# Altium schematic symbol library PCM2706CPJTR.SchLib: 1 symbol
Pins are listed as number, name and electrical type; pins without a type are passive.

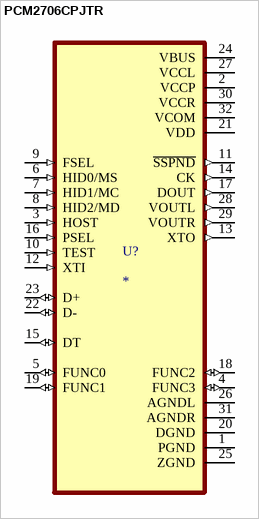
[diagram p0: symbol PCM2706CPJTR]

## PCM2706CPJTR
designator U?
MP: PCM2706CPJTR; Package: None; Price: None; Value: *; Availability: Unavailable
footprint QFP80P900X900X120-32N
pins: 1 PGND (power), 2 VCCP (power), 3 HOST (in), 4 FUNC3 (io), 5 FUNC0 (io), 6 HID0/MS (in), 7 HID1/MC (in), 8 HID2/MD (in), 9 FSEL (in), 10 TEST (in), 11 ~{SSPND} (out), 12 XTI (in), 13 XTO (out), 14 CK (out), 15 DT (io), 16 PSEL (in), 17 DOUT (out), 18 FUNC2 (io), 19 FUNC1 (io), 20 DGND (power), 21 VDD (power), 22 D- (io), 23 D+ (io), 24 VBUS (power), 25 ZGND (power), 26 AGNDL (power), 27 VCCL (power), 28 VOUTL (out), 29 VOUTR (out), 30 VCCR (power), 31 AGNDR (power), 32 VCOM (power)